# Altium schematic symbol library LNA.SchLib: 11 symbols
Pins are listed as number, name and electrical type; pins without a type are passive.

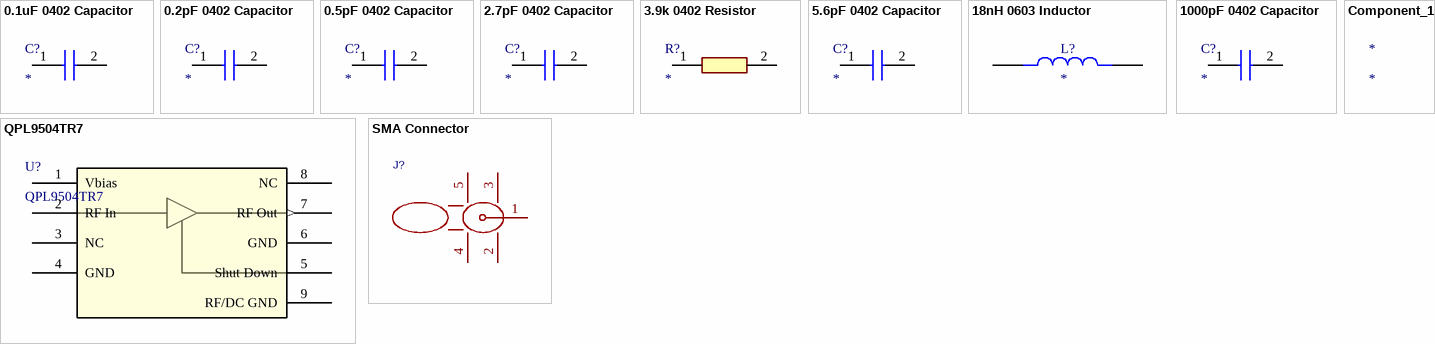
[diagram p0: symbols 0.1uF 0402 Capacitor to SMA Connector]

## 0.1uF 0402 Capacitor
designator C?
GRM155R61A104KA01D; Manufacturer_Name: Murata Electronics; Datasheet Link: https://search.murata.co.jp/Ceramy/image/img/A01X/G101/ENG/GRM155R61A104KA01-02A.pdf; Height: 0.7mm; Manufacturer_Part_Number: GRM155R61A104KA01D; Mouser Part Number: 81-GRM155R61A104KA01; Mouser Price/Stock: https://www.mouser.co.uk/ProductDetail/Murata-Electronics/GRM155R61A104KA01D?qs=5bAuhL3RhmNZw0v59AqOJA%3D%3D; Arrow Part Number: GRM155R61A104KA01D; Arrow Price/Stock: https://www.arrow.com/en/products/grm155r61a104ka01d/murata-manufacturing?utm_currency=USD&region=nac
footprint CAPC1005X70N
pins: 1, 2

## 0.2pF 0402 Capacitor
designator C?
GJM1555C1HR20BB01D; Manufacturer_Name: Murata Electronics; Datasheet Link: https://search.murata.co.jp/Ceramy/image/img/A01X/G101/ENG/GJM1555C1HR20BB01-01A.pdf; Height: 0.55mm; Manufacturer_Part_Number: GJM1555C1HR20BB01D
footprint CAPC1005X55N
pins: 1, 2

## 0.5pF 0402 Capacitor
designator C?
GJM1555C1HR50BB01D; Manufacturer_Name: Murata Electronics; Datasheet Link: https://search.murata.co.jp/Ceramy/image/img/A01X/G101/ENG/GJM1555C1HR50BB01-01A.pdf; Height: 0.55mm; Manufacturer_Part_Number: GJM1555C1HR50BB01D; Mouser Part Number: 81-GJM1555C1HR50BB01; Mouser Price/Stock: https://www.mouser.com/Search/Refine.aspx?Keyword=81-GJM1555C1HR50BB01; Arrow Part Number: GJM1555C1HR50BB01D; Arrow Price/Stock: https://www.arrow.com/en/products/gjm1555c1hr50bb01d/murata-manufacturing
footprint CAPC1005X55N
pins: 1, 2

## 2.7pF 0402 Capacitor
designator C?
GJM1555C1H2R7CB01D; Manufacturer_Name: Murata Electronics; Datasheet Link: https://search.murata.co.jp/Ceramy/image/img/A01X/G101/ENG/GJM1555C1H2R7CB01-01A.pdf; Height: 0.55mm; Manufacturer_Part_Number: GJM1555C1H2R7CB01D; Mouser Part Number: 81-GJM1555C1H2R7CB1D; Mouser Price/Stock: https://www.mouser.com/Search/ProductDetail.aspx?qs=%2fCESi%252brw7l%252bwXyZVZJ18SA%3d%3d; Arrow Part Number: GJM1555C1H2R7CB01D; Arrow Price/Stock: https://www.arrow.com/en/products/gjm1555c1h2r7cb01d/murata-manufacturing
footprint CAPC1005X55N
pins: 1, 2

## 3.9k 0402 Resistor
designator R?
RC0402FR-073K9L; Manufacturer_Name: Yageo Group; Datasheet Link: http://www.yageo.com/documents/recent/PYu-RC0402_51_RoHS_L_6_r.pdf; Height: 0.4mm; Manufacturer_Part_Number: RC0402FR-073K9L; Mouser Part Number: 603-RC0402FR-073K9L; Mouser Price/Stock: https://www.mouser.co.uk/ProductDetail/Yageo/RC0402FR-073K9L?qs=YUgVZYePFqAZ%2F08ApUOsXg%3D%3D; Arrow Part Number: RC0402FR-073K9L; Arrow Price/Stock: https://www.arrow.com/en/products/rc0402fr-073k9l/yageo
footprint RESC1005X40N
pins: 1, 2

## 5.6pF 0402 Capacitor
designator C?
GJM1555C1H5R6CB01D; Manufacturer_Name: Murata Electronics; Datasheet Link: https://search.murata.co.jp/Ceramy/image/img/A01X/G101/ENG/GJM1555C1H5R6CB01-01A.pdf; Height: 0.55mm; Manufacturer_Part_Number: GJM1555C1H5R6CB01D; Mouser Part Number: 81-GJM1555C1H5R6CB01; Mouser Price/Stock: https://www.mouser.co.uk/ProductDetail/Murata-Electronics/GJM1555C1H5R6CB01D?qs=8NPnst0KC%2FrMobio5LeaaQ%3D%3D; Arrow Part Number: GJM1555C1H5R6CB01D; Arrow Price/Stock: https://www.arrow.com/en/products/gjm1555c1h5r6cb01d/murata-manufacturing?region=nac
footprint CAPC1005X55N
pins: 1, 2

## 18nH 0603 Inductor
designator L?
0603CS-18NXJRW; Package: None; Price: None; Value: *; MP: 0603CS-18NXJRW; Availability: Unavailable
footprint IND_0603CS-18NXJRW
pins: 1, 2

## 1000pF 0402 Capacitor
designator C?
GRM155R71H102KA01D; Manufacturer_Name: Murata Electronics; Datasheet Link: https://search.murata.co.jp/Ceramy/image/img/A01X/G101/ENG/GRM155R71H102KA01-01A.pdf; Height: 0.7mm; Manufacturer_Part_Number: GRM155R71H102KA01D; Mouser Part Number: 81-GRM36X102K50; Mouser Price/Stock: https://www.mouser.co.uk/ProductDetail/Murata-Electronics/GRM155R71H102KA01D?qs=%252B5p24MMGZE%2FUF%252ByMyO6GBQ%3D%3D; Arrow Part Number: GRM155R71H102KA01D; Arrow Price/Stock: https://www.arrow.com/en/products/grm155r71h102ka01d/murata-manufacturing?utm_currency=USD&region=nac
footprint CAPC1005X70N
pins: 1, 2

## Component_1
designator *

## QPL9504TR7
designator U?
Description; Manufacturer_Name: Qorvo; Copyright: Copyright (C) 2026 Ultra Librarian. All rights reserved.; Manufacturer_Part_Number: QPL9504TR7; RefDes: RefDes; Type: Type
footprint SON_504TR7_QOR
pins: 1 Vbias, 2 RF In, 3 NC, 4 GND (power), 5 Shut Down, 6 GND (power), 7 RF Out (out), 8 NC, 9 RF/DC GND (power)

## SMA Connector
designator J?
732511153; Manufacturer: MOLEX; AddInBom: yes; Connector Type: Board Side; Number of Ports: 1; Value: 18GHz; RF Series: SMA; Impedance: 50Ω; Rated Voltage (Max): 500V; Symbol: 732511153; Device: 732511153; LCSC Part Name: SMA; SupplierPart: C5859238; ManufacturerPart: 732511153; Supplier Footprint: -; JLCPCB Part Class: Extended Part; Supplier: LCSC; ConvertToPcb: yes; FootprintName: SMA-SMD_732511153
footprint SMA-SMD_732511153
pins: 1, 2, 3, 4, 5